# EAGLE library part SN74LVC14APWRG3 (library SN74LVC14APWRG3)
Hex Schmitt-Trigger Inverter Source: Datasheet <http://www.ti.com/lit/gpn/sn74lvc14a>
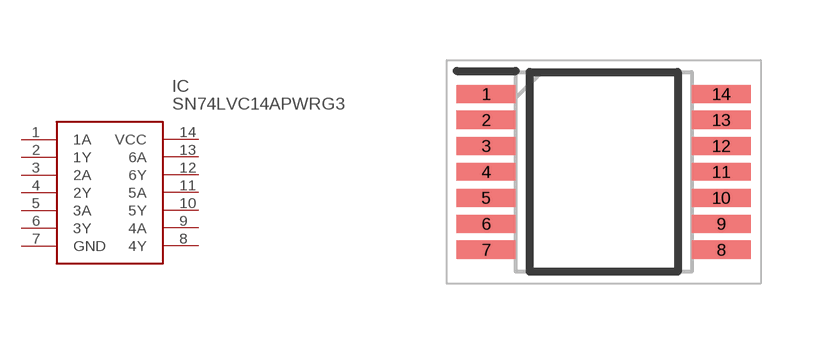
[diagram p0: symbol with the pads of SOP65P640X120-14N; footprint SOP65P640X120-14N]

Designator prefix IC

## SN74LVC14APWRG3 (Description: Hex Schmitt-Trigger Inverter; Height: 1.2mm; Manufacturer_Name: Texas Instruments; Manufacturer_Part_Number: SN74LVC14APWRG3; Mouser_Part_Number: 595-SN74LVC14APWRG3; Mouser_Price-Stock: https://www.mouser.co.uk/ProductDetail/Texas-Instruments/SN74LVC14APWRG3?qs=GI4%2FryNtbd0oVXocaK57NQ%3D%3D)  [SOP65P640X120-14N]
1  1A
2  1Y
3  2A
4  2Y
5  3A
6  3Y
7  GND
8  4Y
9  4A
10  5Y
11  5A
12  6Y
13  6A
14  VCC

## Footprint SOP65P640X120-14N (pad centres in mm)
PW
smd 1.475 x 0.45: 1 -2.938,1.95; 2 -2.938,1.3; 3 -2.938,0.65; 4 -2.938,0; 5 -2.938,-0.65; 6 -2.938,-1.3; 7 -2.938,-1.95; 8 2.938,-1.95; 9 2.938,-1.3; 10 2.938,-0.65; 11 2.938,0; 12 2.938,0.65; 13 2.938,1.3; 14 2.938,1.95